# Altium footprint library POGO_LIQUID_TEST_V1.0.PcbLib: 8 footprints
Each footprint in its own frame and in the unit in brackets; x right, y up, seen from the top. Pads: shape width x height; smd on the part's side, far side on the other; paste and mask are expansions set on the pad; w line width, h text height; cw(c..) or ccw(c..) is an arc to the next point about the centre after c.
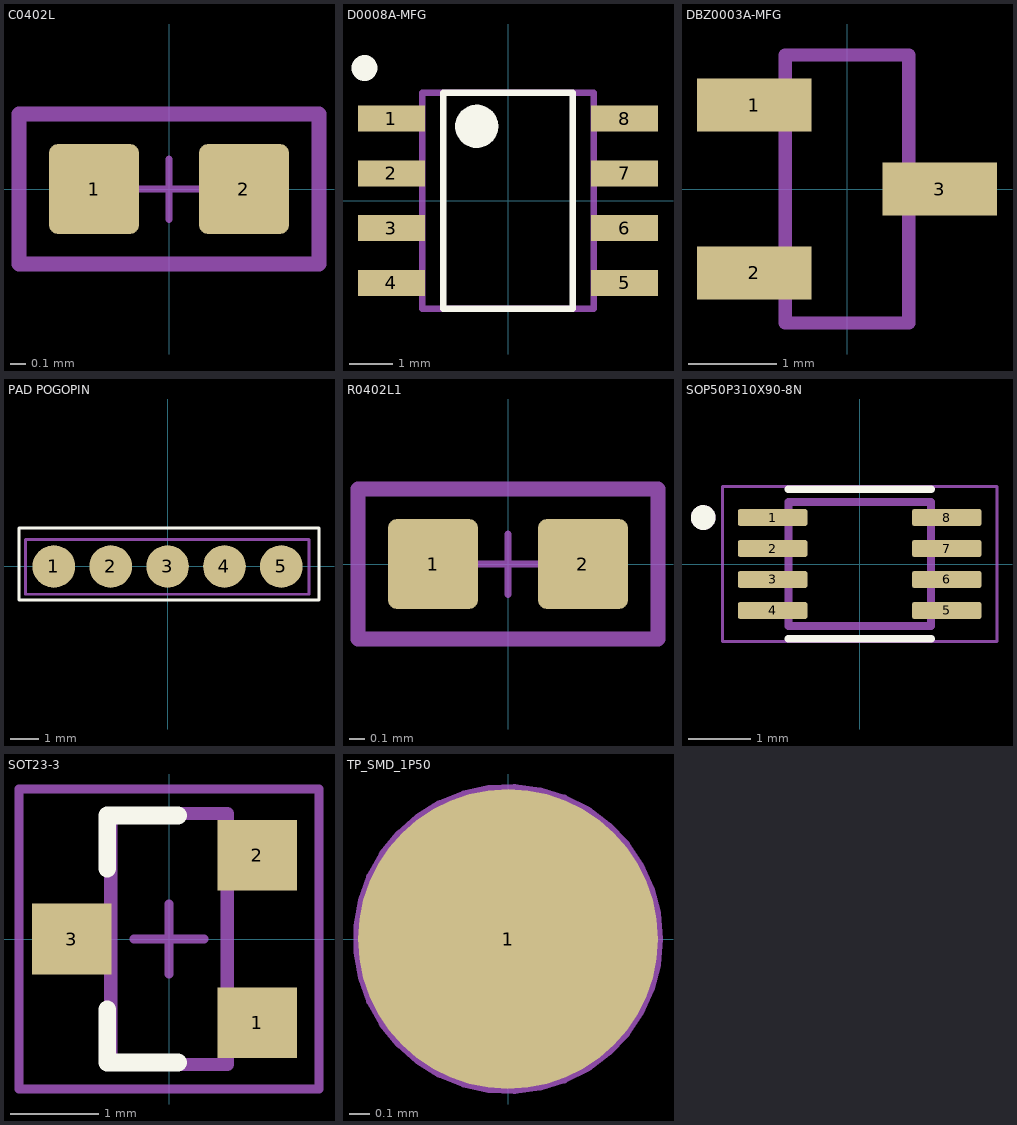
[diagram p0: the footprints below, top view; thin cyan lines are the x and y axes]

## C0402L [mm]
height 0.7
pads (2):
  rrect20% 0.6x0.6 smd paste+0.05 mask+0.05: 1(-0.5,0) 2(0.5,0)
Mechanical 5:
  lines w0.1: -1,-0.5 -1,0.5 1,0.5 1,-0.5 -1,-0.5
  text ".Designator" at -0.725,-0.225 h0.7
Top Component Center:
  lines w0.05: -0.2,0 0.2,0 ; 0,-0.2 0,0.2 ; -1,-0.5 -1,0.5 1,0.5 1,-0.5 -1,-0.5
3D body "User Library-Capacitor 0402.step": height 0.49, standoff -0.01, extent -0.5,-0.25 0.5,0.25

## D0008A-MFG [mm]
pads (8):
  rect 1.55x0.6 smd paste+0 mask+0: 1(-2.7,1.905) 2(-2.7,0.635) 3(-2.7,-0.635) 4(-2.7,-1.905) 5(2.7,-1.905) 6(2.7,-0.635) 7(2.7,0.635) 8(2.7,1.905)
Top Overlay:
  circle w0.5: c-0.725,1.725 r0.25
  circle w0.3: c-3.325,3.075 r0.15
  lines w0.15: -1.5,-2.5 1.5,-2.5 1.5,2.5 -1.5,2.5 -1.5,-2.5
Mechanical 13:
  lines w0.15: -1.99,-2.5 1.99,-2.5 1.99,2.5 -1.99,2.5 -1.99,-2.5
3D body "D0008A.stp": height 1.63, standoff 0, extent -3.011,-2.451 3.011,2.451

## DBZ0003A-MFG [mm]
pads (3):
  rect 1.3x0.6 smd paste+0 mask+0: 1(-1.05,0.95) 2(-1.05,-0.95) 3(1.05,0)
Mechanical 5:
  lines w0.1: -0.7,-1.525 0.725,-1.525 0.725,1.5 0.7,1.525 -0.7,1.525 -0.7,-1.525
  text ".Designator" at -0.096,-0.163 h1.52
Mechanical 13:
  lines w0.15: -0.7,-1.52 -0.7,1.52 0.7,1.52 0.7,-1.52 -0.7,-1.52
3D body "DBZ0003A.stp": height 1, standoff 0, extent -1.27,-1.46 1.27,1.46

## PAD POGOPIN [mm]
pads (5):
  round 1.5 smd paste-2539.97: 1(-4,0) 2(-2,0) 3(0,0) 4(2,0) 5(4,0)
Top Overlay:
  lines w0.1: -5.225,-1.175 5.325,-1.175 5.325,1.35 -5.225,1.35 -5.225,-1.175
Mechanical 5:
  lines w0.1: -5,-0.975 4.975,-0.975 4.975,0.95 -5,0.95 -5,-0.975

## R0402L1 [mm]
height 0.51
pads (2):
  rrect20% 0.6x0.6 smd paste+0.05 mask+0.05: 1(-0.5,0) 2(0.5,0)
Mechanical 5:
  lines w0.1: -1,-0.5 1,-0.5 1,0.5 -1,0.5 -1,-0.5
  text ".Designator" at -0.725,-0.225 h0.7
Top Component Center:
  lines w0.05: -0.2,0 0.2,0 ; 0,-0.2 0,0.2 ; -1,-0.5 1,-0.5 1,0.5 -1,0.5 -1,-0.5
3D body "User Library-0402(1005M) Res.step": height 0.51, standoff 0, extent -0.5,-0.254 0.516,0.254

## SOP50P310X90-8N [mm]
pads (8):
  rrect25% 1.12x0.27 smd: 1(-1.405,0.75) 2(-1.405,0.25) 3(-1.405,-0.25) 4(-1.405,-0.75) 5(1.405,-0.75) 6(1.405,-0.25) 7(1.405,0.25) 8(1.405,0.75)
Top Overlay:
  circle w0.2: c-2.525,0.75 r0.1
  lines w0.127: -1.15,-1.205 1.15,-1.205 ; -1.15,1.205 1.15,1.205
Mechanical 13:
  circle w0.2: c-2.525,0.75 r0.1
  lines w0.127: -1.15,-1 1.15,-1 1.15,1 -1.15,1 -1.15,-1
Top Component Center:
  lines w0.05: -2.215,-1.25 2.215,-1.25 2.215,1.25 -2.215,1.25 -2.215,-1.25
3D body "step_temp.STEP": height 0.9, standoff 0, extent -1.55,-1 1.55,1

## SOT23-3 [mm]
pads (3):
  rect 0.9x0.8 smd: 1(1,-0.95) 2(1,0.95) 3(-1.1,0)
Top Overlay:
  lines w0.203: -0.7,-0.8 -0.7,-1.4 0.1,-1.4 ; -0.7,0.8 -0.7,1.4 0.1,1.4
Mechanical 5:
  lines w0.1: -1.7,-1.7 1.7,-1.7 1.7,1.7 -1.693,1.7 -1.7,1.693 -1.7,1.6 -1.7,-1.7
  text ".Designator" at -0.3,0 h1.52
Mechanical 13:
  lines w0.152: -0.66,-1.422 -0.66,1.422 0.66,1.422 0.66,-1.422 -0.66,-1.422
Top Component Center:
  lines w0.1: -0.4,0 0.4,0 ; 0,-0.4 0,0.4 ; -1.7,-1.7 1.7,-1.7 1.7,1.7 -1.7,1.7 -1.7,-1.7
3D body "step_temp.STEP": height 1.25, standoff 0, extent -1.4,-1.45 1.4,1.45

## TP_SMD_1P50 [mm] "Single 1.50 mm round top-layer copper test point for probing"
pads (1):
  round 1.5 smd: 1(0,0)
Mechanical 1:
  circle w0.051: c0,0 r0.75